# Altium footprint library RLC.PcbLib: 32 footprints (part 2 of 2)
Each footprint in its own frame and in the unit in brackets; x right, y up, seen from the top. Pads: shape width x height; smd on the part's side, far side on the other; paste and mask are expansions set on the pad; w line width, h text height; cw(c..) or ccw(c..) is an arc to the next point about the centre after c.
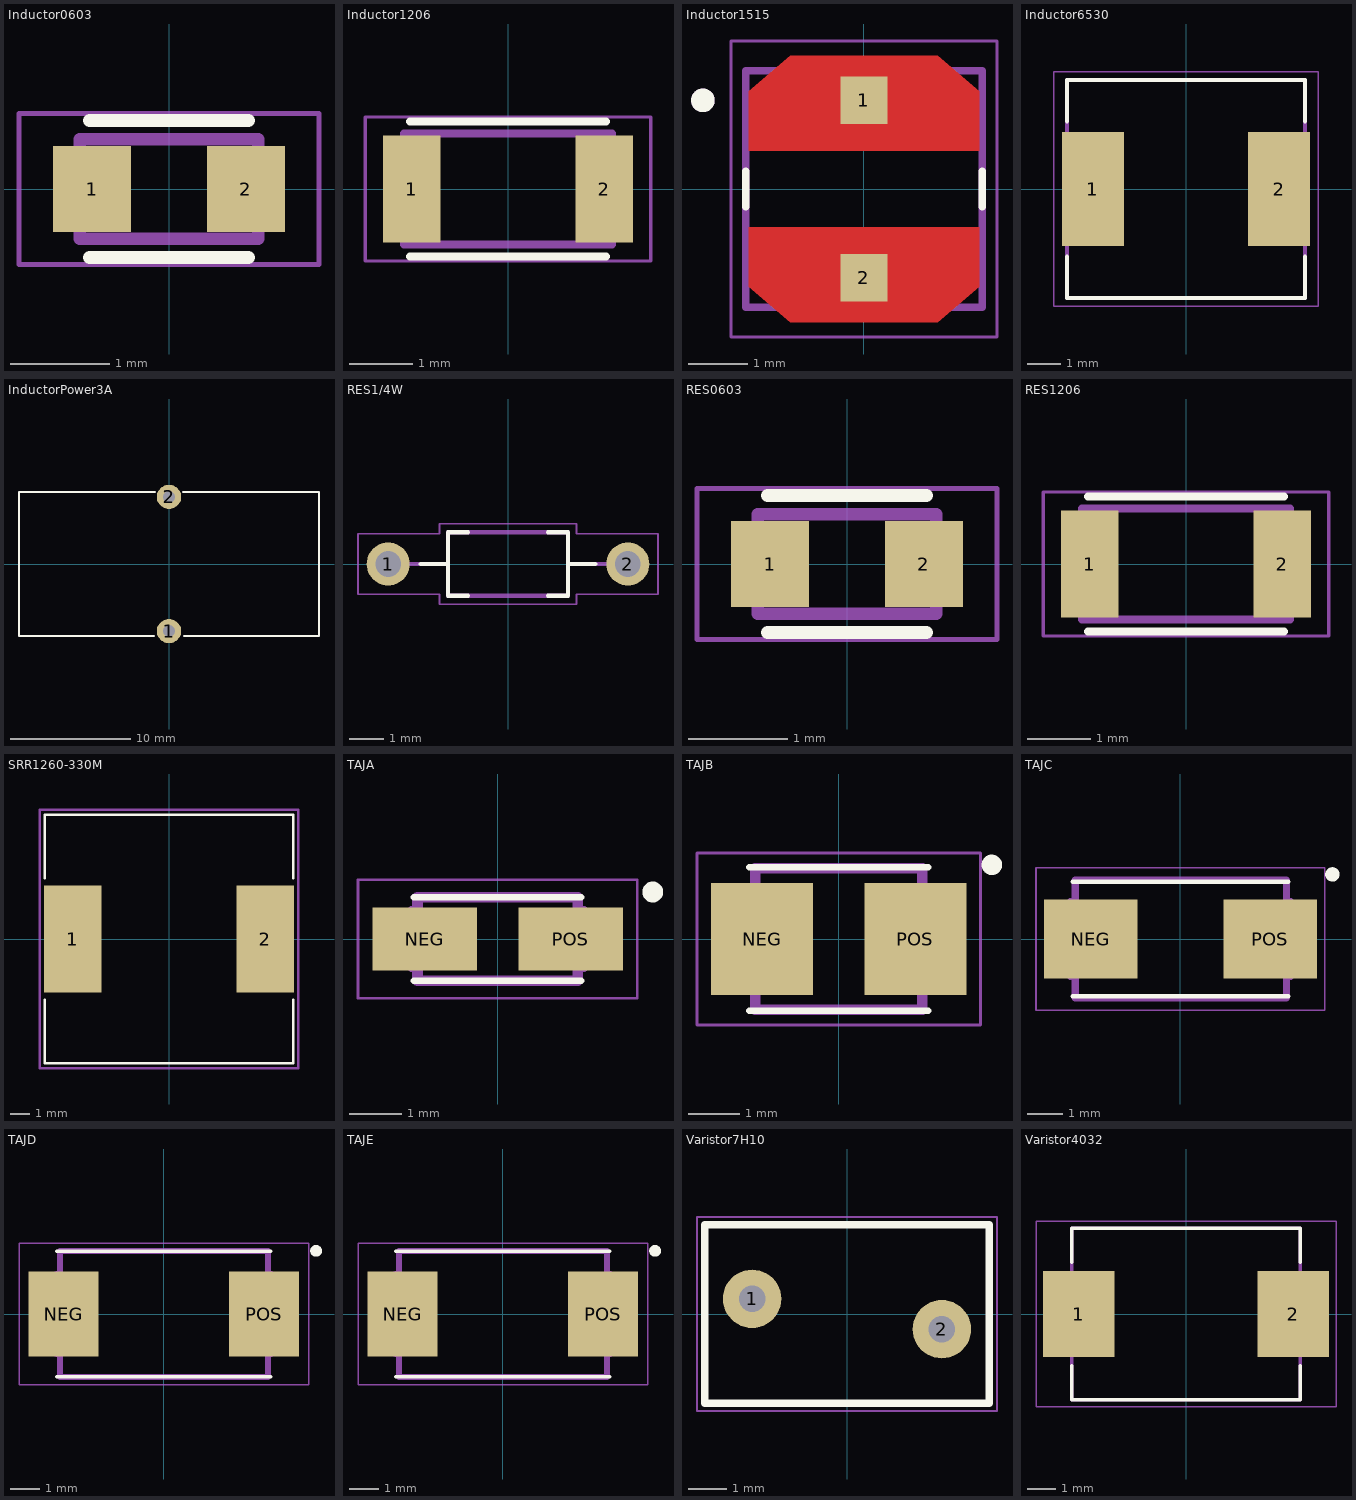
[diagram p1: the footprints below, top view; thin cyan lines are the x and y axes]

## Inductor0603 [mil] "InductorC1608X50N"
pads (2):
  rect 31x34 smd: 1(-30.5,0) 2(30.5,0)
Top Overlay:
  lines w5: -31.5,-27.17 31.5,-27.17 ; -31.5,27.17 31.5,27.17
Mechanical 13:
  lines w5: -35.43,-19.68 -35.43,19.68 35.43,19.68 35.43,-19.68 -35.43,-19.68
Mechanical 15:
  lines w1.97: -59.45,-29.92 -59.45,29.92 59.45,29.92 59.45,-29.92 -59.45,-29.92
3D body "Inductor0603.STEP": height 32.75, standoff 1.25, extent -31.5,-18.5 31.5,18.9

## Inductor1206 [mil] "Inductor3115X65N"
pads (2):
  rect 36x67 smd: 1(-60,0) 2(60,0)
Top Overlay:
  lines w5: -61.02,-41.93 61.02,-41.93 ; -61.02,41.93 61.02,41.93
Mechanical 13:
  lines w5: -64.96,-34.65 -64.96,34.65 64.96,34.65 64.96,-34.65 -64.96,-34.65
Mechanical 15:
  lines w1.97: -88.98,-44.88 -88.98,44.88 88.98,44.88 88.98,-44.88 -88.98,-44.88
3D body "Inductor1206.stp": height 31.89, standoff 0.39, extent -62.99,-31.5 62.99,31.5

## Inductor1515 [mm] "SMD Inductor 4.7uH 1.57A 4mm x 4mm x 2.8mm"
height 2
pads (2):
  rect 0.8x0.8 smd paste-1 mask+0: 1(0,1.5) 2(0,-1.5)
Top Layer:
  region: 1.95,1.65 1.95,0.65 -1.95,0.65 -1.95,1.65 -1.25,2.25 1.25,2.25
  region: 1.95,-1.65 1.25,-2.25 -1.25,-2.25 -1.95,-1.65 -1.95,-0.65 1.95,-0.65
Top Overlay:
  circle w0.2: c-2.725,1.5 r0.1
  lines w0.127: -2,-0.3 -2,0.3 ; 2,-0.3 2,0.3
Top Paste:
  region: 1.95,1.65 1.95,0.65 -1.95,0.65 -1.95,1.65 -1.25,2.25 1.25,2.25
  region: 1.95,-1.65 1.25,-2.25 -1.25,-2.25 -1.95,-1.65 -1.95,-0.65 1.95,-0.65
Top Solder:
  region: 2.05,1.7 2.05,0.55 -2.05,0.55 -2.05,1.7 -1.3,2.35 1.3,2.35
  region: 2.05,-1.7 1.3,-2.35 -1.3,-2.35 -2.05,-1.7 -2.05,-0.55 2.05,-0.55
Mechanical 13:
  circle w0.2: c-2.725,1.5 r0.1
  lines w0.127: -2,-2 -2,2 2,2 2,-2 -2,-2
Mechanical 15:
  lines w0.05: -2.25,-2.5 -2.25,2.5 2.25,2.5 2.25,-2.5 -2.25,-2.5
3D body "step_temp.STEP": height 2.8, standoff 0, extent -2,-2 2,2

## Inductor6530 [mm] "SPM6530T-100M"
height 3
pads (2):
  rect 1.85x3.4 smd: 1(-2.775,0) 2(2.775,0)
Top Overlay:
  lines w0.127: -3.55,-2.02 -3.55,-3.25 3.55,-3.25 3.55,-2.02 ; -3.55,2.02 -3.55,3.25 3.55,3.25 3.55,2.02
Mechanical 13:
  lines w0.127: -3.55,-3.25 -3.55,3.25 3.55,3.25 3.55,-3.25 -3.55,-3.25
Mechanical 15:
  lines w0.05: -3.95,-3.5 -3.95,3.5 3.95,3.5 3.95,-3.5 -3.95,-3.5
3D body "step_temp.STEP": height 3, standoff 0, extent -3.55,-3.25 3.55,3.25

## InductorPower3A [mil] "InductorPower3A"
pads (2):
  round 80 hole 40: 1(0,-220) 2(0,220)
Top Overlay:
  lines w6: -48.78,-236.22 -492.13,-236.22 -492.13,236.22 -46.22,236.22 ; 46.22,236.22 492.13,236.22 492.13,-236.22 48.78,-236.22
3D body "InductorPower3A.stp": height 992.04, standoff -373.43, extent -492.04,-236.22 492.04,236.22

## RES1/4W [mm] "RESAD700W45L350D185"
height 3.85
pads (2):
  round 1.258 hole 0.75: 1(-3.5,0) 2(3.5,0)
Top Overlay:
  lines w0.127: -2.55,0 -1.75,0 ; -1.17,-0.925 -1.75,-0.925 -1.75,0 ; -1.17,0.925 -1.75,0.925 -1.75,0 ; 1.17,-0.925 1.75,-0.925 1.75,0 ; 1.17,0.925 1.75,0.925 1.75,0 ; 2.55,0 1.75,0
Mechanical 13:
  lines w0.127: -2.925,0 -1.75,0 ; 2.925,0 1.75,0 ; -1.75,0 -1.75,0.925 1.75,0.925 1.75,0 ; -1.75,0 -1.75,-0.925 1.75,-0.925 1.75,0
Mechanical 15:
  lines w0.05: -4.38,-0.88 -4.38,0.88 -2,0.88 -2,1.175 2,1.175 2,0.88 4.38,0.88 4.38,-0.88 2,-0.88 2,-1.175 -2,-1.175 -2,-0.88 -4.38,-0.88
3D body "step_temp.STEP": height 1.84, standoff -3.6, extent -3.723,-0.923 3.723,0.923

## RES0603 [mil] "RESC1608X50N"
pads (2):
  rect 31x34 smd: 1(-30.5,0) 2(30.5,0)
Top Overlay:
  lines w5: -31.5,-27.17 31.5,-27.17 ; -31.5,27.17 31.5,27.17
Mechanical 13:
  lines w5: -35.43,-19.68 -35.43,19.68 35.43,19.68 35.43,-19.68 -35.43,-19.68
Mechanical 15:
  lines w1.97: -59.45,-29.92 -59.45,29.92 59.45,29.92 59.45,-29.92 -59.45,-29.92
3D body "RES0603.stp": height 17.72, standoff 0, extent -31.5,-15.75 31.5,15.76

## RES1206 [mil] "RESC3115X65N"
pads (2):
  rect 36x67 smd: 1(-60,0) 2(60,0)
Top Overlay:
  lines w5: -61.02,-41.93 61.02,-41.93 ; -61.02,41.93 61.02,41.93
Mechanical 13:
  lines w5: -64.96,-34.65 -64.96,34.65 64.96,34.65 64.96,-34.65 -64.96,-34.65
Mechanical 15:
  lines w1.97: -88.98,-44.88 -88.98,44.88 88.98,44.88 88.98,-44.88 -88.98,-44.88
3D body "RES1206.step": height 21.65, standoff 0, extent -62.99,-31.5 62.99,31.5

## SRR1260-330M [mm] "INDP125125X600N"
pads (2):
  rect 2.9x5.4 smd: 1(-4.85,0) 2(4.85,0)
Top Overlay:
  lines w0.127: -6.25,-3.05 -6.25,-6.25 6.25,-6.25 6.25,-3.05 ; -6.25,3.05 -6.25,6.25 6.25,6.25 6.25,3.05
Mechanical 15:
  lines w0.127: -6.5,-6.5 6.5,-6.5 6.5,6.5 -6.5,6.5 -6.5,-6.5
3D body "SRR1260-330M.stp": height 6, standoff 0, extent -6.25,-6.25 6.25,6.25

## TAJA [mm]
pads (2):
  rect 2x1.2 smd: NEG(-1.4,0) POS(1.4,0)
Top Overlay:
  circle w0.2: c2.969,0.9 r0.1
  lines w0.127: -1.6,-0.8 1.6,-0.8 ; -1.6,0.8 1.6,0.8
Mechanical 13:
  lines w0.152: -1.651,-0.559 -1.651,0.559 -1.651,-0.559 ; 1.651,-0.559 1.651,0.559 1.651,-0.559
  lines w0.203: -1.535,-0.798 1.535,-0.798 ; -1.535,-0.798 -1.535,0.798 ; -1.535,-0.798 1.535,-0.798 ; -1.535,-0.798 -1.535,0.798 ; -1.535,0.798 1.535,0.798 ; -1.535,0.798 1.535,0.798 ; 1.535,-0.798 1.535,0.798 ; 1.535,-0.798 1.535,0.798
Mechanical 15:
  lines w0.051: -2.673,-1.133 -2.673,1.133 2.673,1.133 2.673,-1.133 -2.673,-1.133
3D body "TAJA.step": height 1.8, standoff -0.04, extent -2.39,-0.902 2.405,0.902

## TAJB [mm]
pads (2):
  rect 2x2.2 smd: NEG(-1.5,0) POS(1.5,0)
Top Overlay:
  circle w0.2: c2.996,1.45 r0.1
  lines w0.127: -1.75,-1.4 1.75,-1.4 ; -1.75,1.4 1.75,1.4
Mechanical 13:
  lines w0.152: -1.778,-1.016 -1.778,1.016 -1.778,-1.016 ; 1.778,-1.016 1.778,1.016 1.778,-1.016
  lines w0.203: -1.637,-1.383 1.637,-1.383 ; -1.637,-1.383 -1.637,1.383 ; -1.637,-1.383 1.637,-1.383 ; -1.637,-1.383 -1.637,1.383 ; -1.637,1.383 1.637,1.383 ; -1.637,1.383 1.637,1.383 ; 1.637,-1.383 1.637,1.383 ; 1.637,-1.383 1.637,1.383
Mechanical 15:
  lines w0.051: -2.773,-1.683 -2.773,1.683 2.773,1.683 2.773,-1.683 -2.773,-1.683
3D body "TAJB.step": height 2.11, standoff -0.04, extent -2.51,-1.499 2.489,1.499

## TAJC [mm]
pads (2):
  rect 2.6x2.2 smd: NEG(-2.5,0) POS(2.5,0)
Top Overlay:
  circle w0.2: c4.236,1.8 r0.1
  lines w0.127: -3,-1.6 3,-1.6 ; -3,1.6 3,1.6
Mechanical 13:
  lines w0.152: -3.073,-1.067 -3.073,1.067 -3.073,-1.067 ; 3.073,-1.067 3.073,1.067 3.073,-1.067
  lines w0.203: -2.932,-1.637 -2.932,1.637 ; -2.932,-1.637 2.957,-1.637 ; -2.932,-1.637 -2.932,1.637 ; -2.932,-1.637 2.957,-1.637 ; -2.932,1.637 2.957,1.637 ; -2.932,1.637 2.957,1.637 ; 2.957,-1.637 2.957,1.637 ; 2.957,-1.637 2.957,1.637
Mechanical 15:
  lines w0.051: -4.023,-1.983 4.023,-1.983 4.023,1.983 -4.023,1.983 -4.023,-1.983
3D body "TAJC.step": height 2.79, standoff -0.04, extent -3.83,-1.756 3.767,1.756

## TAJD [mm]
pads (2):
  rect 2.4x2.9 smd: NEG(-3.429,0) POS(3.429,0)
Top Overlay:
  circle w0.2: c5.207,2.159 r0.1
  lines w0.127: -3.65,-2.15 3.65,-2.15 ; -3.65,2.15 3.65,2.15
Mechanical 13:
  lines w0.152: -3.683,-1.397 -3.683,1.397 ; 3.683,-1.397 3.683,1.397
  lines w0.203: -3.556,-2.159 -3.556,2.159 3.556,2.159 3.556,-2.159 -3.556,-2.159
Mechanical 15:
  lines w0.051: -4.953,-2.413 4.953,-2.413 4.953,2.413 -4.953,2.413 -4.953,-2.413
3D body "TAJD.step": height 3.1, standoff -0.04, extent -4.554,-2.305 4.442,2.305

## TAJE [mm]
pads (2):
  rect 2.4x2.9 smd: NEG(-3.429,0) POS(3.429,0)
Top Overlay:
  circle w0.2: c5.207,2.159 r0.1
  lines w0.127: -3.65,-2.15 3.65,-2.15 ; -3.65,2.15 3.65,2.15
Mechanical 13:
  lines w0.152: -3.683,-1.397 -3.683,1.397 ; 3.683,-1.397 3.683,1.397
  lines w0.203: -3.556,-2.159 -3.556,2.159 3.556,2.159 3.556,-2.159 -3.556,-2.159
Mechanical 15:
  lines w0.051: -4.953,-2.413 4.953,-2.413 4.953,2.413 -4.953,2.413 -4.953,-2.413
3D body "TAJE.step": height 3.91, standoff -0.04, extent -4.498,-2.326 4.498,2.326

## Varistor7H10 [mm] "Varistor7H10"
height 10.5
pads (2):
  round 1.54 hole 0.7: 1(-2.5,0.4) 2(2.5,-0.4)
Top Overlay:
  lines w0.2: -3.75,-2.35 -3.75,2.35 3.75,2.35 3.75,-2.35 -3.75,-2.35
Top Assembly:
  lines w0.1: -3.75,-2.35 3.75,-2.35 3.75,2.35 -3.75,2.35 -3.75,-2.35
Mechanical 15:
  lines w0.05: -3.95,-2.55 3.95,-2.55 3.95,2.55 -3.95,2.55 -3.95,-2.55
3D body "820452001.stp": height 8.14, standoff -22.85, extent -2.994,-1.55 2.994,1.55

## Varistor4032 [mm] "Varistor4032"
height 3.5
pads (2):
  rect 2.5x3 smd: 1(-3.75,0) 2(3.75,0)
Top Overlay:
  lines w0.127: -4,-1.82 -4,-3 4,-3 4,-1.82 ; -4,1.82 -4,3 4,3 4,1.82
Mechanical 13:
  lines w0.127: -4,-3 4,-3 4,3 -4,3 -4,-3
Mechanical 15:
  lines w0.05: -5.25,-3.25 5.25,-3.25 5.25,3.25 -5.25,3.25 -5.25,-3.25
3D body "step_temp.STEP": height 3.2, standoff 0, extent -4,-3.2 4,3.2